# Altium footprint library PCB_V2.PcbLib: 86 footprints (part 6 of 6)
Each footprint in its own frame and in the unit in brackets; x right, y up, seen from the top. Pads: shape width x height; smd on the part's side, far side on the other; paste and mask are expansions set on the pad; w line width, h text height; cw(c..) or ccw(c..) is an arc to the next point about the centre after c.
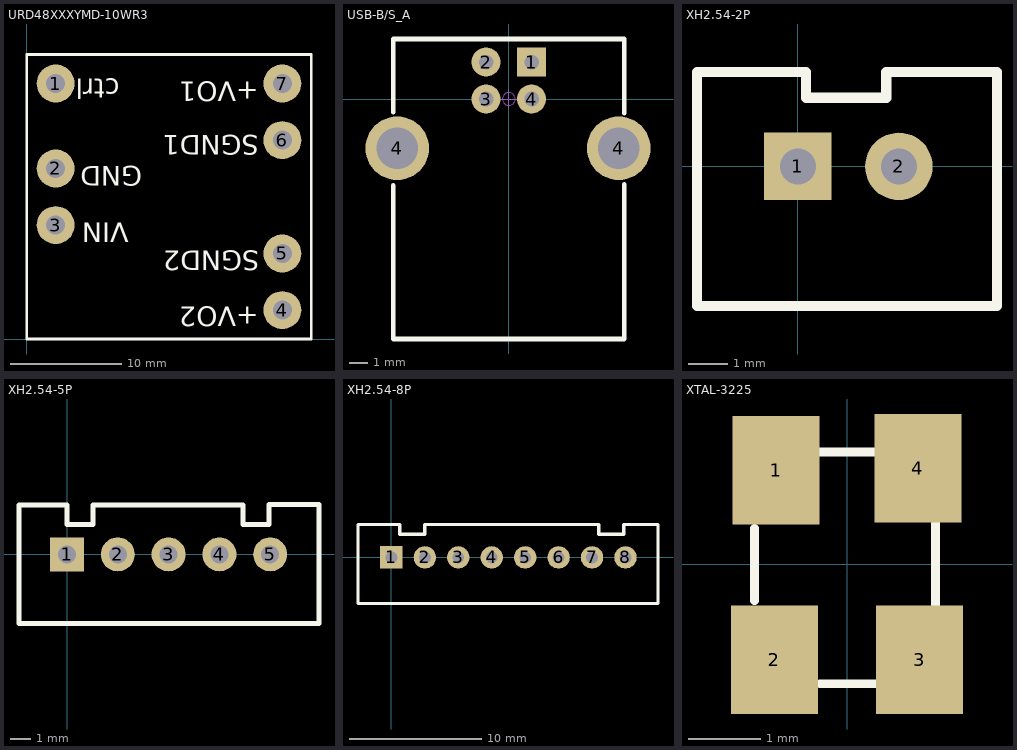
[diagram p5: the footprints below, top view; thin cyan lines are the x and y axes]

## URD48XXXYMD-10WR3 [mm]
height 11.7
pads (7):
  round 3.4 hole 1.7: 1(2.59,22.91) 2(2.59,15.29) 3(2.59,10.21) 4(22.91,2.59) 5(22.91,7.67) 6(22.91,17.83) 7(22.91,22.91)
Top Overlay:
  lines w0.254: 0,0 0,25.5 25.5,25.5 25.5,0 0,0
  text "+VO1" at 20.777,23.673 h3
  text "SGND1" at 20.777,18.847 h3
  text "SGND2" at 20.828,8.509 h3
  text "+VO2" at 20.777,3.48 h3
  text "VIN" at 9.144,11.024 h3
  text "GND" at 10.363,16.078 h3
  text "ctrl" at 8.331,23.901 h3

## USB-B/S_A [mm] "b型USB 母座 16."
height 1.1
pads (6):
  rect 1.6x1.6 hole 0.8: 1(1.25,2.032)
  round 1.6 hole 0.8: 2(-1.25,2.032) 3(-1.25,0) 4(1.25,0)
  round 3.5 hole 2.3: 4(-6.141,-2.71) 4(6.051,-2.71)
Top Overlay:
  lines w0.254: -6.35,-4.737 -6.35,-13.208 6.35,-13.208 6.35,-4.686 ; -6.35,-0.724 -6.35,3.302 6.35,3.302 6.35,-0.775
Mechanical 15:
  circle w0.05: c0,0 r0.35
  lines w0.05: -0.5,0 0.5,0 ; 0,-0.5 0,0.5
3D body: height 11.45, standoff -2.95, extent -6.86,-13.16 6.859,3.14

## XH2.54-2P [mm] "?"
pads (2):
  rect 1.7x1.7 hole 0.9: 1(0,0)
  round 1.7 hole 0.9: 2(2.54,0)
Top Overlay:
  lines w0.254: -2.537,-3.505 5.006,-3.505 5.006,2.37 4.224,2.37 2.223,2.37 2.223,1.727 0.203,1.727 0.203,2.37 -2.537,2.37 -2.537,-3.505
3D body: height 7.05, standoff -2.45, extent -2.5,-3.3 5.04,2.4

## XH2.54-5P [mm] "?"
pads (5):
  rect 1.7x1.7 hole 0.9: 1(0,0)
  round 1.7 hole 0.9: 2(2.54,0) 3(5.08,0) 4(7.62,0) 5(10.16,0)
Top Overlay:
  lines w0.254: 1.3,2.438 1.3,1.5 0,1.5 0,2.464 -2.4,2.464 -2.4,-3.454 12.6,-3.454 12.6,2.489 10.1,2.489 10.1,1.5 8.8,1.5 8.8,2.464 1.3,2.464
3D body: height 7.03, standoff -2.47, extent -2.5,-3.3 12.66,2.4

## XH2.54-8P [mm] "?"
pads (8):
  rect 1.7x1.7 hole 0.9: 1(0,0)
  round 1.7 hole 0.9: 2(2.54,0) 3(5.08,0) 4(7.62,0) 5(10.16,0) 6(12.7,0) 7(15.24,0) 8(17.78,0)
Top Overlay:
  lines w0.254: -2.54,-3.5 20.25,-3.5 20.25,2.5 17.653,2.5 17.653,1.75 15.748,1.75 15.748,2.5 2.54,2.5 2.54,1.75 0.635,1.75 0.635,2.5 -2.54,2.5 -2.54,-3.5
3D body: height 7.05, standoff -2.45, extent -2.5,-3.3 20.28,2.4

## XTAL-3225 [mm]
pads (4):
  rect 1.2x1.5 smd: 1(-0.978,1.295) 2(-1.003,-1.321) 3(1.003,-1.321) 4(0.978,1.321)
Top Overlay:
  lines w0.12: -1.278,-0.505 -1.278,0.495 ; -0.378,-1.655 0.422,-1.655 ; -0.378,1.545 0.422,1.545 ; 1.222,-0.605 1.222,0.595
3D body: height 0.8, standoff 0, extent -1.268,-1.651 1.232,1.549